# Altium schematic symbol library 141E61.SchLib: 1 symbol
Pins are listed as number, name and electrical type; pins without a type are passive.

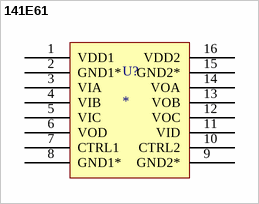
[diagram p0: symbol 141E61]

## 141E61
designator U?
4-Channel Digital Isolator, 3 Forward/1 Reverse, 5kVrms Isolation, SOIC-16 Wide , (300mil), SMD,π141E61
footprint SOIC127P1032X265-16N
pins: 1 VDD1, 2 GND1*, 3 VIA, 4 VIB, 5 VIC, 6 VOD, 7 CTRL1, 8 GND1*, 9 GND2*, 10 CTRL2, 11 VID, 12 VOC, 13 VOB, 14 VOA, 15 GND2*, 16 VDD2